# Altium footprint library Relay$.PcbLib: 38 footprints (part 2 of 3)
Each footprint in its own frame and in the unit in brackets; x right, y up, seen from the top. Pads: shape width x height; smd on the part's side, far side on the other; paste and mask are expansions set on the pad; w line width, h text height; cw(c..) or ccw(c..) is an arc to the next point about the centre after c.
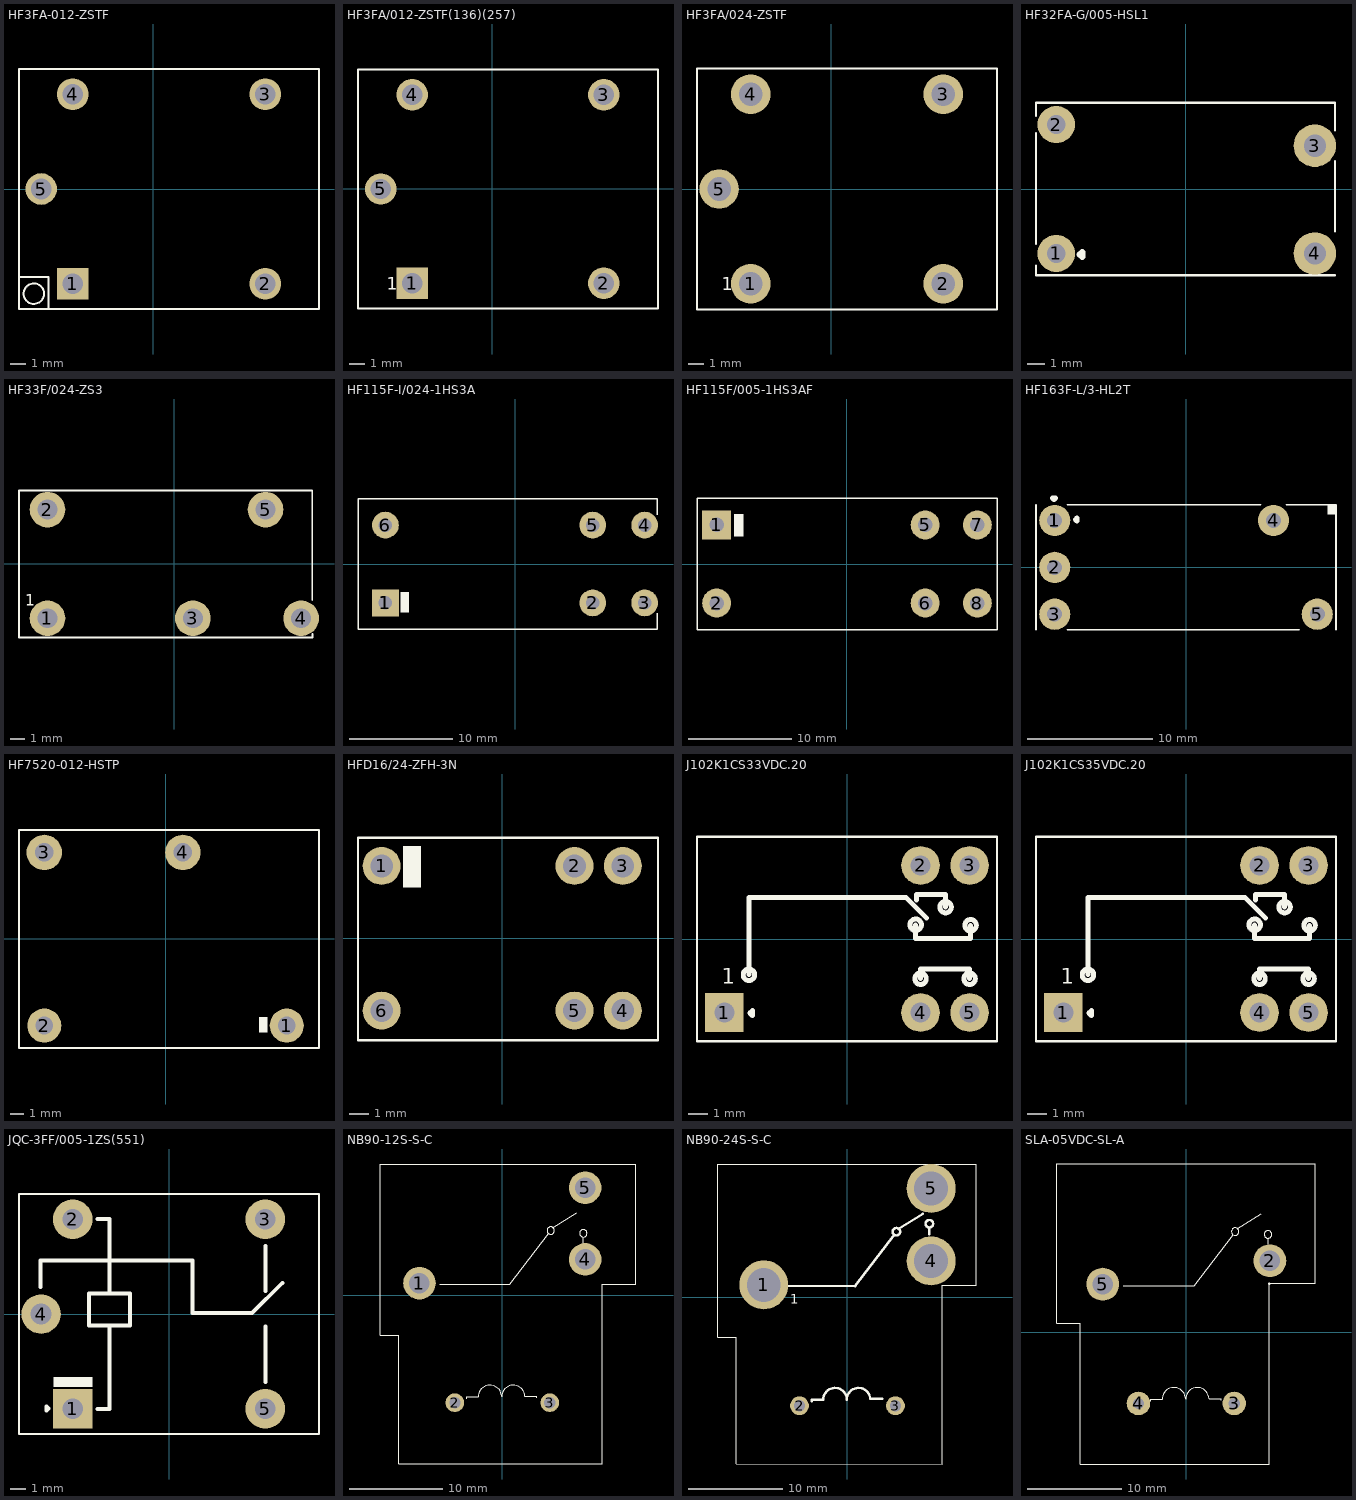
[diagram p1: the footprints below, top view; thin cyan lines are the x and y axes]

## HF3FA-012-ZSTF [mm]
pads (5):
  rect 2x2 hole 1.3 paste-2539.97 mask+0.051: 1(-5.1,-6)
  round 2 hole 1.3 paste-2539.97 mask+0.051: 2(7.1,-6) 3(7.1,6) 4(-5.1,6) 5(-7.1,0)
Top Overlay:
  circle w0.127: c-7.56,-6.63 r0.646
  lines w0.127: -8.5,-5.57 -6.64,-5.57 -6.64,-7.6 ; 10.48,7.6 -8.5,7.6 -8.5,-7.6 10.5,-7.6 10.5,7.6
3D body "3D_PCB1_2024-05-29.step": height 15.5, standoff -3.5, extent -8.5,-7.6 10.5,7.61

## HF3FA/012-ZSTF(136)(257) [mm]
pads (5):
  rect 2x2 hole 1.3 paste-2539.97 mask+0.051: 1(-5.1,-6)
  round 2 hole 1.3 paste-2539.97 mask+0.051: 2(7.1,-6) 3(7.1,6) 4(-5.1,6) 5(-7.1,0)
Top Overlay:
  lines w0.127: -8.55,-7.62 -8.55,7.62 10.551,7.62 10.551,-7.62 -8.55,-7.62
  text "1" at -6.706,-6.426 h0.8
3D body "3D_PCB1_2024-05-03.step": height 15.5, standoff -3.5, extent -8.5,-7.6 10.5,7.61

## HF3FA/024-ZSTF [mm]
pads (5):
  round 2.5 hole 1.5 paste-2539.97 mask+0.051: 1(-5.1,-6) 2(7.1,-6) 3(7.1,6) 4(-5.1,6) 5(-7.1,0)
Top Overlay:
  lines w0.127: -8.5,-7.62 10.5,-7.62 10.5,7.62 -8.5,7.62 -8.5,-7.62
  text "1" at -6.934,-6.426 h0.8
3D body "C194242.step": height 15.5, standoff -3.5, extent -8.5,-7.6 10.5,7.61

## HF32FA-G/005-HSL1 [mm]
pads (4):
  round 2.2 hole 1.1: 1(-7.62,-3.8) 2(-7.62,3.8)
  round 2.5 hole 1.3: 3(7.62,2.55) 4(7.62,-3.8)
Top Overlay:
  lines w0.127: -8.814,-4.521 -8.814,-5.08 8.814,-5.08 ; -8.814,-3.226 -8.814,3.282 ; -8.814,4.318 -8.814,5.08 8.814,5.08 8.814,3.454 ; 8.814,-2.515 8.814,1.646
  lines w0.4: -6.214,-3.866 -6.087,-3.739 -6.087,-3.993 -6.214,-3.866
3D body "HF32FA-G_005-HSL1.STEP": height 12.6, standoff -3.5, extent -8.8,-5.05 8.8,5.06

## HF33F/024-ZS3 [mm]
pads (5):
  round 2.5 hole 1.4 paste-2539.97 mask+0.051: 1(-8.9,-3.81) 2(-8.9,3.81) 3(1.3,-3.81) 4(8.9,-3.81) 5(6.4,3.81)
Top Overlay:
  lines w0.127: 9.677,-2.54 9.677,5.156 -10.897,5.156 -10.897,-5.163 9.7,-5.163 9.7,-4.903
  text "1" at -10.465,-2.921 h0.8
3D body "3D_PCB1_2024-06-12.step": height 16.9, standoff -2.4, extent -10.86,-5.11 9.64,5.1

## HF115F-I/024-1HS3A [mm]
pads (7):
  rect 2.6x2.6 hole 1.3: 1(-12.6,-3.78) 1(-12.6,-3.78)
  round 2.6 hole 1.3: 2(7.56,-3.78) 3(12.6,-3.78) 4(12.6,3.78) 5(7.56,3.78) 6(-12.6,3.78)
Top Overlay:
  rectangle: -11.125,-4.724 -10.287,-2.718
  lines w0.127: 13.818,4.801 13.818,6.35 -15.262,6.35 -15.262,-6.35 13.843,-6.35 13.843,-4.801
3D body "HF115F-I_024-1HS3A-1.STEP": height 15.8, standoff -3.5, extent -15.2,-6.35 13.8,6.36

## HF115F/005-1HS3AF [mm]
pads (6):
  rect 2.8x2.8 hole 1.4: 1(-12.6,3.78)
  round 2.8 hole 1.4: 2(-12.6,-3.78) 5(7.56,3.78) 6(7.56,-3.78) 7(12.6,3.78) 8(12.6,-3.78)
Top Overlay:
  rectangle: -10.947,2.642 -10.008,4.826
  lines w0.127: -14.5,-6.35 14.5,-6.35 14.5,6.35 -14.5,6.35 -14.5,-6.35

## HF163F-L/3-HL2T [mm]
pads (6):
  round 2.5 hole 1.2: 1(-10.5,3.75) 1(-10.5,3.75) 2(-10.5,0) 3(-10.5,-3.75) 4(7,3.75) 5(10.5,-3.75)
Top Overlay:
  rectangle: 11.303,4.242 12,5
  lines w0.127: -12,-5 -12,5 ; -9.495,-5 -5.5,-5 9.068,-5 ; -9.495,5 -5.5,5 5.965,5 ; 8.005,5 12,5 12,-5
  lines w0.4: -10.693,5.537 -10.439,5.537 -10.566,5.41 -10.693,5.537 ; -8.84,3.816 -8.713,3.689 -8.713,3.943 -8.84,3.816
3D body "HF163F-L_3-HL2T.STEP": height 19.62, standoff -3.18, extent -11.975,-4.978 12.025,5.032

## HF7520-012-HSTP [mm]
pads (4):
  round 2.5 hole 1.3: 1(8.89,-6.35) 2(-8.89,-6.35)
  round 2.6 hole 1.35: 3(-8.89,6.35) 4(1.27,6.35)
Top Overlay:
  rectangle: 6.858,-6.858 7.493,-5.715
  lines w0.127: -10.746,-8 -10.746,8 11.254,8 11.254,-8 -10.746,-8
3D body "HF7520-012-HSTP.STEP": height 10.7, standoff -3.5, extent -10.746,-8.009 11.254,8.001

## HFD16/24-ZFH-3N [mm]
pads (6):
  round 2 hole 1.2 paste-2539.97 mask+0.051: 1(-6.35,3.81) 2(3.81,3.81) 3(6.35,3.81) 4(6.35,-3.81) 5(3.81,-3.81) 6(-6.35,-3.81)
Top Overlay:
  rectangle: -5.222,2.681 -4.283,4.866
  lines w0.127: 8.205,-5.38 -7.595,-5.38 -7.595,5.3 8.205,5.3 8.205,-5.3
3D body "C399482.step": height 11.8, standoff -3.5, extent -7.55,-5.3 8.15,5.31

## J102K1CS33VDC.20 [mm]
pads (5):
  rect 2x2 hole 1.02: 1(-6.35,-3.81)
  round 2 hole 1.02: 2(3.81,3.81) 3(6.35,3.81) 4(3.81,-3.81) 5(6.35,-3.81)
Top Overlay:
  circle w0.254: c-5.08,-1.854 r0.297
  circle w0.254: c6.35,-2.057 r0.297
  circle w0.254: c3.81,-2.057 r0.297
  circle w0.254: c3.556,0.737 r0.297
  circle w0.254: c6.401,0.711 r0.297
  circle w0.254: c5.105,1.651 r0.297
  lines w0.127: -7.77,-5.29 7.77,-5.29 7.77,0 7.77,5.29 -7.77,5.29 -7.77,0 -7.77,-5.29
  lines w0.254: -5.08,-1.854 -5.08,2.159 3.048,2.159 4.115,1.092 ; 3.556,0.737 3.556,0.025 6.401,0.025 6.401,0.711 ; 3.607,2.007 3.607,2.311 5.105,2.311 5.105,1.651 ; 3.81,-2.057 3.81,-1.549 6.35,-1.549 6.35,-2.057 ; -5.029,-3.835 -4.902,-3.708 -4.902,-3.962 -5.029,-3.835
  text "1" at -6.477,-2.311 h0.8
3D body "J102K1CS35VDC.STEP": height 11.8, standoff -3.25, extent -7.77,-5.29 7.77,5.29

## J102K1CS35VDC.20 [mm]
pads (5):
  rect 2x2 hole 1.02: 1(-6.35,-3.81)
  round 2 hole 1.02: 2(3.81,3.81) 3(6.35,3.81) 4(3.81,-3.81) 5(6.35,-3.81)
Top Overlay:
  circle w0.254: c5.105,1.651 r0.297
  circle w0.254: c6.401,0.711 r0.297
  circle w0.254: c3.556,0.737 r0.297
  circle w0.254: c3.81,-2.057 r0.297
  circle w0.254: c6.35,-2.057 r0.297
  circle w0.254: c-5.08,-1.854 r0.297
  lines w0.127: -7.77,-5.29 -7.77,0 -7.77,5.29 7.77,5.29 7.77,0 7.77,-5.29 -7.77,-5.29
  lines w0.254: -5.08,-1.854 -5.08,2.159 3.048,2.159 4.115,1.092 ; 3.556,0.737 3.556,0.025 6.401,0.025 6.401,0.711 ; 3.607,2.007 3.607,2.311 5.105,2.311 5.105,1.651 ; 3.81,-2.057 3.81,-1.549 6.35,-1.549 6.35,-2.057 ; -5.029,-3.835 -4.902,-3.962 -4.902,-3.708 -5.029,-3.835
  text "1" at -6.477,-2.311 h0.8
3D body "J102K1CS35VDC.STEP": height 11.8, standoff -3.25, extent -7.77,-5.29 7.77,5.29

## JQC-3FF/005-1ZS(551) [mm]
pads (5):
  rect 2.5x2.5 hole 1.32: 1(-6.1,-6)
  round 2.5 hole 1.32: 2(-6.1,6) 3(6.1,6) 4(-8.1,0) 5(6.1,-6)
Top Overlay:
  region: -4.836,-4.624 -4.836,-3.989 -7.325,-3.989 -7.325,-4.624
  lines w0.127: -9.5,-7.6 -9.5,7.6 9.5,7.6 ; -9.5,-7.595 9.5,-7.595 9.5,7.605
  lines w0.254: -8.128,1.702 -8.128,3.378 1.499,3.378 1.499,0.051 5.258,0.051 7.188,1.981 ; -4.521,6.02 -3.759,6.02 -3.759,1.295 ; 6.121,-4.318 6.121,-0.787 ; 6.121,1.448 6.121,4.318 ; -3.759,-6.02 -3.759,-0.711 ; -3.759,-6.02 -4.521,-6.02 -3.759,-6.02 ; -3.759,-0.711 -2.464,-0.711 -2.464,1.295 -3.759,1.295 ; -3.759,-0.711 -5.055,-0.711 -5.055,1.295 -3.759,1.295 ; -7.772,-6.096 -7.772,-5.842 -7.645,-5.969 -7.772,-6.096
3D body "JQC-3FF-005-1ZS-551_C9221.STEP": height 15, standoff -4, extent -9.5,-7.6 9.5,7.6

## NB90-12S-S-C [mm]
pads (5):
  round 3.5 hole 2.2 paste-2539.97 mask+0.051: 1(-8.9,1.3) 4(8.9,3.85) 5(8.9,11.55)
  round 2 hole 1.2 paste-2539.97 mask+0.051: 2(-5.1,-11.55) 3(5.1,-11.55)
Top Overlay:
  circle w0.127: c5.201,6.95 r0.401
  circle w0.127: c8.701,6.652 r0.401
  lines w0.127: -6.7,1.2 0.82,1.17 5.001,6.652 ; -3.8,-11.1 -3.8,-10.93 -2.578,-10.93 cw(c-1.327,-10.907) -0.078,-10.831 ; -0.078,-10.93 cw(c1.172,-10.907) 2.421,-10.831 3.7,-10.831 3.7,-11.001 ; 5.4,7.251 8.001,8.851 ; 8.702,4.851 8.702,6.25 ; 10.762,-16.701 10.762,1.201 14.361,1.201 14.361,14.099 -13.139,14.099 -13.139,-4.301 -11.14,-4.301 -11.14,-18.131 10.762,-18.131 10.762,-15.8
3D body "3D_PCB1_2024-08-19.step": height 20.2, standoff -3.4, extent -12.99,-18.068 14.21,13.942

## NB90-24S-S-C [mm]
pads (5):
  round 5.2 hole 3.6 paste-2539.97 mask+0.051: 1(-8.9,1.3) 4(8.9,3.85) 5(8.9,11.55)
  round 2 hole 1.2 paste-2539.97 mask+0.051: 2(-5.1,-11.55) 3(5.1,-11.55)
Top Overlay:
  circle w0.254: c8.7,7.8 r0.401
  circle w0.254: c5.201,6.95 r0.401
  lines w0.127: 10.102,-16.65 10.102,1.251 13.701,1.251 13.701,14.15 -13.8,14.15 -13.8,-4.25 -11.8,-4.25 -11.8,-17.75 10.102,-17.75 10.102,-15.749
  lines w0.254: -6.4,1.2 0.82,1.17 5.001,6.652 ; -3.8,-11.1 -3.8,-10.93 -2.578,-10.93 cw(c-1.327,-10.907) -0.078,-10.831 ; -0.078,-10.93 cw(c1.172,-10.907) 2.421,-10.831 3.7,-10.831 3.7,-10.8 ; 5.4,7.251 8.001,8.851 ; 8.7,7.4 8.712,6.68
  text "1" at -6.074,-0.684 h1
3D body "C396907.step": height 20.2, standoff -3.5, extent -12.972,-18.042 14.228,13.968

## SLA-05VDC-SL-A [mm]
pads (4):
  round 3.5 hole 2.2 paste-2539.97 mask+0.051: 2(8.9,7.6) 5(-8.9,5.1)
  round 2.5 hole 1.2 paste-2539.97 mask+0.051: 3(5.1,-7.6) 4(-5.1,-7.6)
Top Overlay:
  circle w0.127: c8.701,10.401 r0.401
  circle w0.127: c5.201,10.7 r0.401
  lines w0.127: -13.8,0.957 -13.8,17.899 13.701,17.899 13.731,17.899 13.731,5.174 8.841,5.174 ; -13.792,0.95 -11.285,0.95 -11.285,-14.051 8.827,-14.051 8.827,5.123 ; -6.7,4.95 0.82,4.92 4.976,10.368 ; -3.8,-7.35 -3.8,-7.18 -2.578,-7.18 cw(c-1.327,-7.157) -0.078,-7.081 ; -0.078,-7.18 cw(c1.172,-7.157) 2.421,-7.081 3.7,-7.081 3.7,-7.251 ; 5.44,11.023 8.001,12.601 ; 8.702,9.341 8.702,10
  lines w0.254: 8.827,5.123 8.841,5.123 8.841,5.174
3D body "3D_PCB1_2024-06-14.step": height 20.4, standoff -3.5, extent -13.85,-14.051 13.75,17.959